# EAGLE library part 6103XX21821_61030621821 (library WR-PHD)
WR-PHD 2.54 mm SMT Dual Socket Header (Reel) ARTICLE PROPERTIES Pins ： 4;​ 6;​ 8;​ 10;​ 12;​ 14;​ 16;​ 18;​ 20;​ 22;​ 24;​ 26 KIND PROPERTIES Pitch 2.54 mm Quality Class 3 as per CECC 75 301-802 Rows Dual Gender Socket Header Type Straight Type 2 MATERIAL PROPERTIES Insulator Material PA46 Insulator Flammability Rating UL94 V-0 Contact Material Copper Alloy Contact Plating Gold Contact Type Stamped GENERAL INFORMATION Operating Temperature -40 up to +105 °C ELECTRICAL PROPERTIES Rated Current 3 A IR1 = 3A Withstanding Voltage 600 V (AC) Contact Resistance 20 mΩ RISO 1000 MΩ CERTIFICATION UL Approval E323964 PACKAGING PROPERTIES Packaging Tape and Reel with Cap <https://katalog.we-online.com/media/images/v2/o33206v209%20Family_WR-PHD_610xxx21821.jpg> Details see: https://katalog.we-online.com/en/em/PHD_2_54_SMT_DUAL_SOCKET_HEADER_REEL_6103XX21821 Updated by Ella Wu 2019-06-12 2019 (C) Würth Elektronik
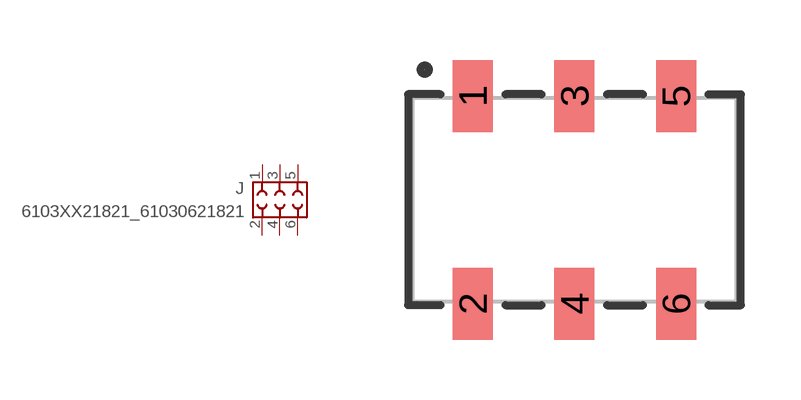
[diagram p287: symbol with the pads of 61030621821; footprint 61030621821]

Designator prefix J

## 6103XX21821_61030621821 (DATASHEET-URL: https://www.we-online.com/redexpert/spec/61030621821?ae; GENDER: Socket Header; IR: 3A; MOUNT: SMT; PACKAGING: Tape and Reel with Cap; PART-NUMBER: 61030621821; PINS: 6; PITCH: 2.54 mm; ROWS: Dual; TYPE: Straight Type 2; VALUE: 61030621821; WE-NUMBER: 61030621821)  [61030621821]
1  1  pas
2  2  pas
3  3  pas
4  4  pas
5  5  pas
6  6  pas

## Footprint 61030621821 (pad centres in mm)
WR-PHD 2.54 mm SMT Dual Socket Header (Reel) , 6 Pins
smd 1 x 1.8: 1 -2.54,2.6; 2 -2.54,-2.6; 3 0,2.6; 4 0,-2.6; 5 2.54,2.6; 6 2.54,-2.6